# Altium footprint library Footprints.PcbLib: 320 footprints (part 2 of 20)
Each footprint in its own frame and in the unit in brackets; x right, y up, seen from the top. Pads: shape width x height; smd on the part's side, far side on the other; paste and mask are expansions set on the pad; w line width, h text height; cw(c..) or ccw(c..) is an arc to the next point about the centre after c.
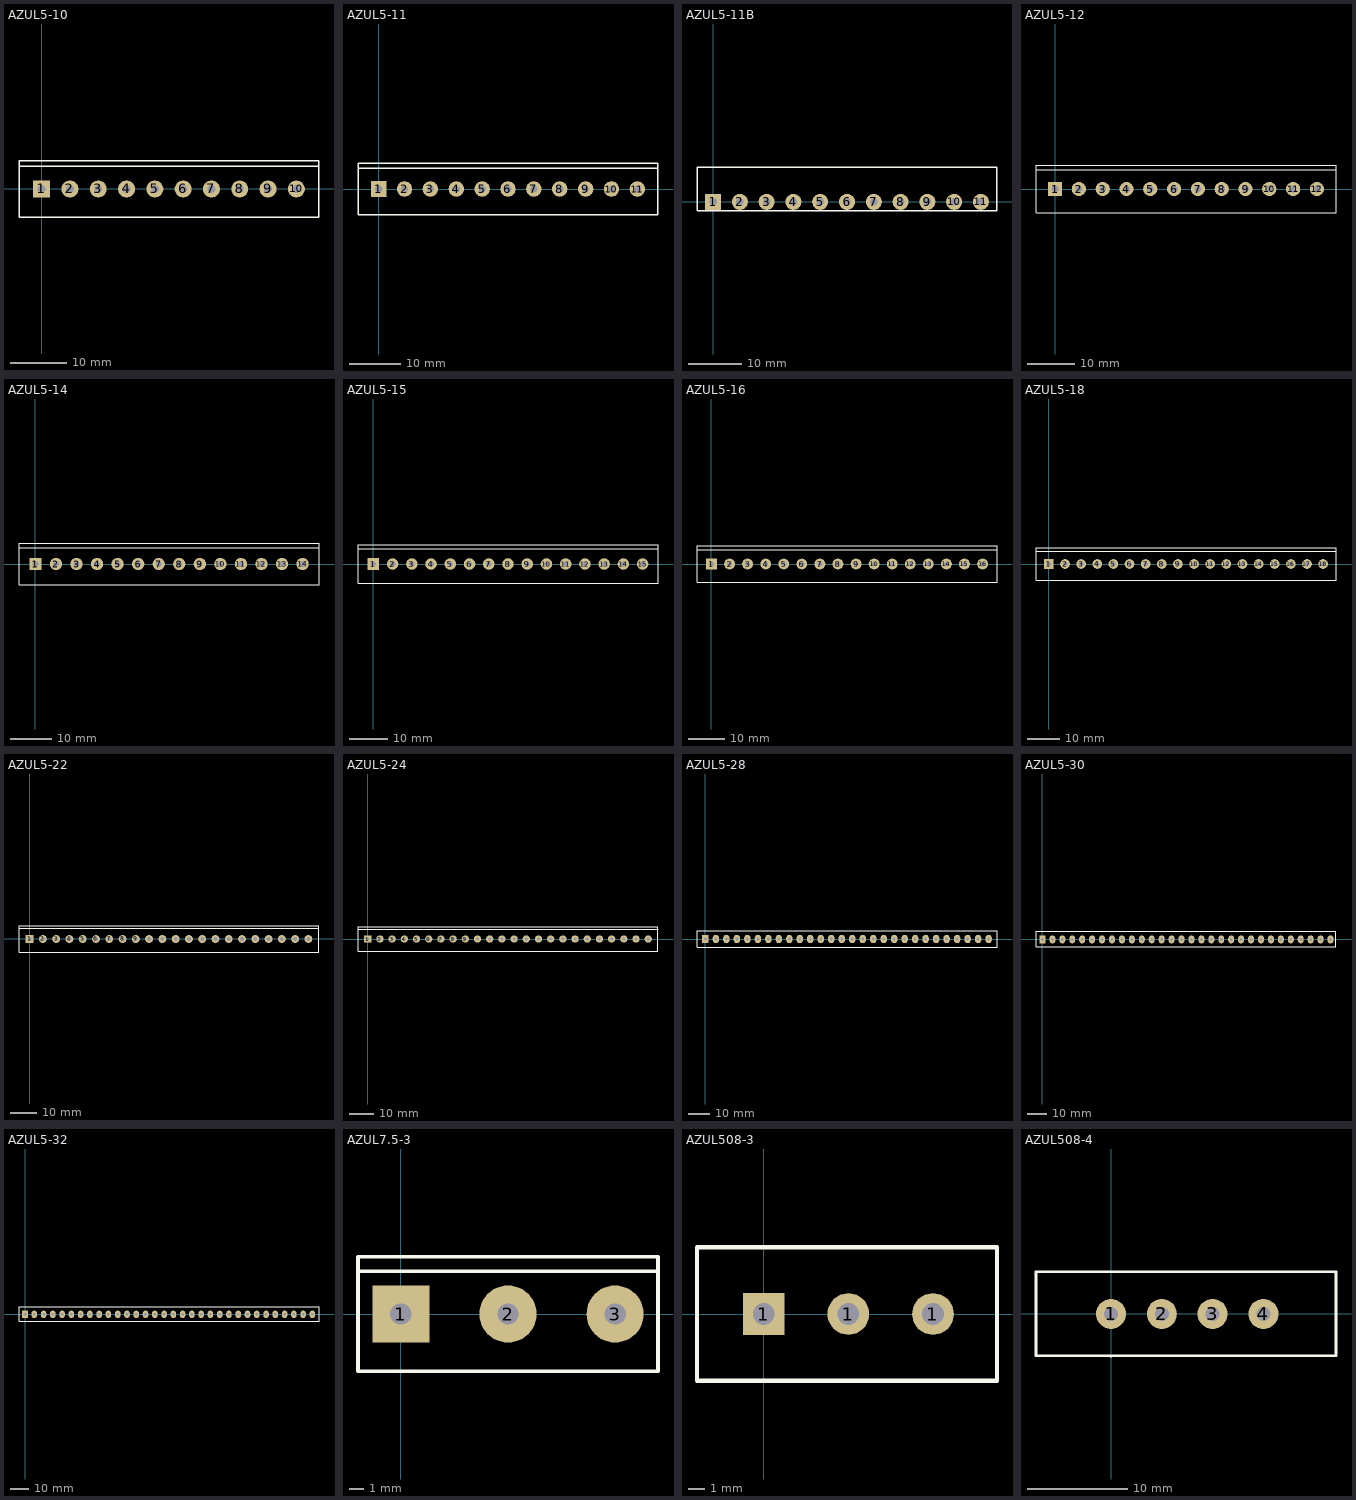
[diagram p1: the footprints below, top view; thin cyan lines are the x and y axes]

## AZUL5-10 [mm]
pads (10):
  rect 3x3 hole 1.4: 1(0,0)
  round 3 hole 1.4: 2(5,0) 3(10,0) 4(15,0) 5(20,0) 6(25,0) 7(30,0) 8(35,0) 9(40,0) 10(45,0)
Top Overlay:
  lines w0.254: -4,-0.06 -4,5 49,5 49,-5 -4,-5 -4,0 ; -4,4 49,4

## AZUL5-11 [mm]
pads (11):
  rect 3x3 hole 1.4: 1(0,0)
  round 3 hole 1.4: 2(5,0) 3(10,0) 4(15,0) 5(20,0) 6(25,0) 7(30,0) 8(35,0) 9(40,0) 10(45,0) 11(50,0)
Top Overlay:
  lines w0.254: -4,-0.06 -4,5 54,5 54,-5 -4,-5 -4,0 ; -4,4 53.9,4

## AZUL5-11B [mm]
pads (11):
  rect 3x3 hole 1.4: 1(0,0)
  round 3 hole 1.4: 2(5,0) 3(10,0) 4(15,0) 5(20,0) 6(25,0) 7(30,0) 8(35,0) 9(40,0) 10(45,0) 11(50,0)
Top Overlay:
  lines w0.254: -3,-1.7 53,-1.7 53,6.5 -3,6.5 -3,-1.7

## AZUL5-12 [mm]
pads (12):
  rect 3x3 hole 1.4: 1(0,0)
  round 3 hole 1.4: 2(5,0) 3(10,0) 4(15,0) 5(20,0) 6(25,0) 7(30,0) 8(35,0) 9(40,0) 10(45,0) 11(50,0) 12(55,0)
Top Overlay:
  lines w0.254: -4,-0.06 -4,5 59,5 59,-5 -4,-5 -4,0 ; -3.98,4 59,4

## AZUL5-14 [mm]
pads (14):
  rect 3x3 hole 1.4: 1(0,0)
  round 3 hole 1.4: 2(5,0) 3(10,0) 4(15,0) 5(20,0) 6(25,0) 7(30,0) 8(35,0) 9(40,0) 10(45,0) 11(50,0) 12(55,0) 13(60,0) 14(65,0)
Top Overlay:
  lines w0.254: -4,-0.06 -4,5 69,5 69,-5 -4,-5 -4,0 ; -3.98,4 69,4

## AZUL5-15 [mm]
pads (15):
  rect 3x3 hole 1.4: 1(0,0)
  round 3 hole 1.4: 2(5,0) 3(10,0) 4(15,0) 5(20,0) 6(25,0) 7(30,0) 8(35,0) 9(40,0) 10(45,0) 11(50,0) 12(55,0) 13(60,0) 14(65,0) 15(70,0)
Top Overlay:
  lines w0.254: -4,-0.06 -4,5 74,5 74,-5 -4,-5 -4,0 ; -3.98,4 74,4

## AZUL5-16 [mm]
pads (16):
  rect 3x3 hole 1.4: 1(0,0)
  round 3 hole 1.4: 2(5,0) 3(10,0) 4(15,0) 5(20,0) 6(25,0) 7(30,0) 8(35,0) 9(40,0) 10(45,0) 11(50,0) 12(55,0) 13(60,0) 14(65,0) 15(70,0) 16(75,0)
Top Overlay:
  lines w0.254: -4,-0.06 -4,5 79,5 79,-5 -4,-5 -4,0 ; -3.98,4 78.89,4

## AZUL5-18 [mm]
pads (18):
  rect 3x3 hole 1.4: 1(0,0)
  round 3 hole 1.4: 2(5,0) 3(10,0) 4(15,0) 5(20,0) 6(25,0) 7(30,0) 8(35,0) 9(40,0) 10(45,0) 11(50,0) 12(55,0) 13(60,0) 14(65,0) 15(70,0) 16(75,0) 17(80,0) 18(85,0)
Top Overlay:
  lines w0.254: -4,0 -4,-5 89,-5 89,5 -4,5 -4,-0.06 -3.98,-0.08 ; -4,4 89,4

## AZUL5-22 [mm]
pads (22):
  rect 3x3 hole 1.4: 1(0,0)
  round 3 hole 1.4: 2(5,0) 3(10,0) 4(15,0) 5(20,0) 6(25,0) 7(30,0) 8(35,0) 9(40,0) 10(45,0) 11(50,0) 12(55,0) 13(60,0) 14(65,0) 15(70,0) 16(75,0) 17(80,0) 18(85,0) 19(90,0) 20(95,0) 21(100,0) 22(105,0)
Top Overlay:
  lines w0.254: -4,0 -4,-5 109,-5 109,5 -4,5 -4,-0.06 -3.98,-0.08 ; -4,4 109,4

## AZUL5-24 [mm]
pads (24):
  rect 3x3 hole 1.4: 1(0,0)
  round 3 hole 1.4: 2(5,0) 3(10,0) 4(15,0) 5(20,0) 6(25,0) 7(30,0) 8(35,0) 9(40,0) 10(45,0) 11(50,0) 12(55,0) 13(60,0) 14(65,0) 15(70,0) 16(75,0) 17(80,0) 18(85,0) 19(90,0) 20(95,0) 21(100,0) 22(105,0) 23(110,0) 24(115,0)
Top Overlay:
  lines w0.254: -4,0 -4,-5 119,-5 119,5 -4,5 -4,-0.06 -3.98,-0.08 ; -4,4 118.96,4 119.01,3.95

## AZUL5-28 [mm]
pads (28):
  rect 3x4 hole 1.4: 1(0,0)
  oval 3x4 hole 1.4: 2(5,0) 3(10,0) 4(15,0) 5(20,0) 6(25,0) 7(30,0) 8(35,0) 9(40,0) 10(45,0) 11(50,0) 12(55,0) 13(60,0) 14(65,0) 15(70,0) 16(75,0) 17(80,0) 18(85,0) 19(90,0) 20(95,0) 21(100,0) 22(105,0) 23(110,0) 24(115,0) 25(120,0) 26(125,0) 27(130,0) 28(135,0)
Top Overlay:
  lines w0.254: -4,-4 138,-4 139,-4 139,4 -4,4 -4,-4

## AZUL5-30 [mm]
pads (30):
  rect 3x4 hole 1.4: 1(0,0)
  oval 3x4 hole 1.4: 2(5,0) 3(10,0) 4(15,0) 5(20,0) 6(25,0) 7(30,0) 8(35,0) 9(40,0) 10(45,0) 11(50,0) 12(55,0) 13(60,0) 14(65,0) 15(70,0) 16(75,0) 17(80,0) 18(85,0) 19(90,0) 20(95,0) 21(100,0) 22(105,0) 23(110,0) 24(115,0) 25(120,0) 26(125,0) 27(130,0) 28(135,0) 29(140,0) 30(145,0)
Top Overlay:
  lines w0.254: -3.24,-3.81 -3.24,4.19 147.76,4.19 147.76,-3.81 -3.24,-3.81

## AZUL5-32 [mm]
pads (32):
  rect 3x4 hole 1.4: 1(0,0)
  oval 3x4 hole 1.4: 2(5,0) 3(10,0) 4(15,0) 5(20,0) 6(25,0) 7(30,0) 8(35,0) 9(40,0) 10(45,0) 11(50,0) 12(55,0) 13(60,0) 14(65,0) 15(70,0) 16(75,0) 17(80,0) 18(85,0) 19(90,0) 20(95,0) 21(100,0) 22(105,0) 23(110,0) 24(115,0) 25(120,0) 26(125,0) 27(130,0) 28(135,0) 29(140,0) 30(145,0) 31(150,0) 32(155,0)
Top Overlay:
  lines w0.254: -3.24,-3.81 -3.24,4.19 158.56,4.19 158.56,-3.81 -3.24,-3.81

## AZUL7.5-3 [mm]
pads (3):
  rect 4x4 hole 1.5: 1(0,0)
  round 4 hole 1.5: 2(7.5,0) 3(15,0)
Top Overlay:
  lines w0.254: -3,3 18,3 ; -3,-4 18,-4 18,4 -3,4 -3,0 -3,-4

## AZUL508-3 [mm]
pads (3):
  rect 2.5x2.5 hole 1.3: 1(0,0)
  round 2.5 hole 1.3: 1(5.08,0) 1(10.16,0)
Top Overlay:
  lines w0.254: -4,-4 14,-4 14,4 -4,4 -4,-4

## AZUL508-4 [mm]
pads (4):
  round 3 hole 1.4: 1(0,0) 2(5.08,0) 3(10.16,0) 4(15.24,0)
Top Overlay:
  lines w0.254: 0,-4.22 0.02,-4.2 22.5,-4.2 22.5,4.2 -7.5,4.2 -7.5,-4.2 0,-4.2